# Altium schematic symbol library AMC3302DWER.SchLib: 1 symbol
Pins are listed as number, name and electrical type; pins without a type are passive.

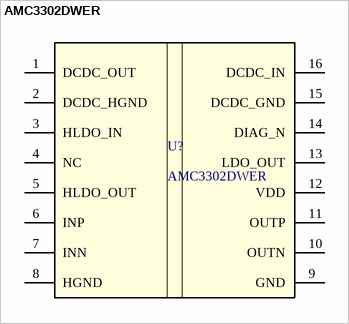
[diagram p0: symbol AMC3302DWER]

## AMC3302DWER
designator U?
±50-mV input, precision reinforced isolated amplifier with integrated DC/DC converter 16-SOIC -40 to 125
footprint DWE0016A-IPC_A
footprint DWE0016A-IPC_B
footprint DWE0016A-IPC_C
footprint DWE0016A-MFG
pins: 1 DCDC_OUT, 2 DCDC_HGND (power), 3 HLDO_IN (power), 4 NC, 5 HLDO_OUT, 6 INP (hiz), 7 INN (hiz), 8 HGND (power), 9 GND (power), 10 OUTN, 11 OUTP, 12 VDD (power), 13 LDO_OUT, 14 DIAG_N (oc), 15 DCDC_GND (power), 16 DCDC_IN (power)